# Altium footprint library WR-TBL_Pluggable Connector_3.50mm.PcbLib: 175 footprints (part 10 of 11)
Each footprint in its own frame and in the unit in brackets; x right, y up, seen from the top. Pads: shape width x height; smd on the part's side, far side on the other; paste and mask are expansions set on the pad; w line width, h text height; cw(c..) or ccw(c..) is an arc to the next point about the centre after c.
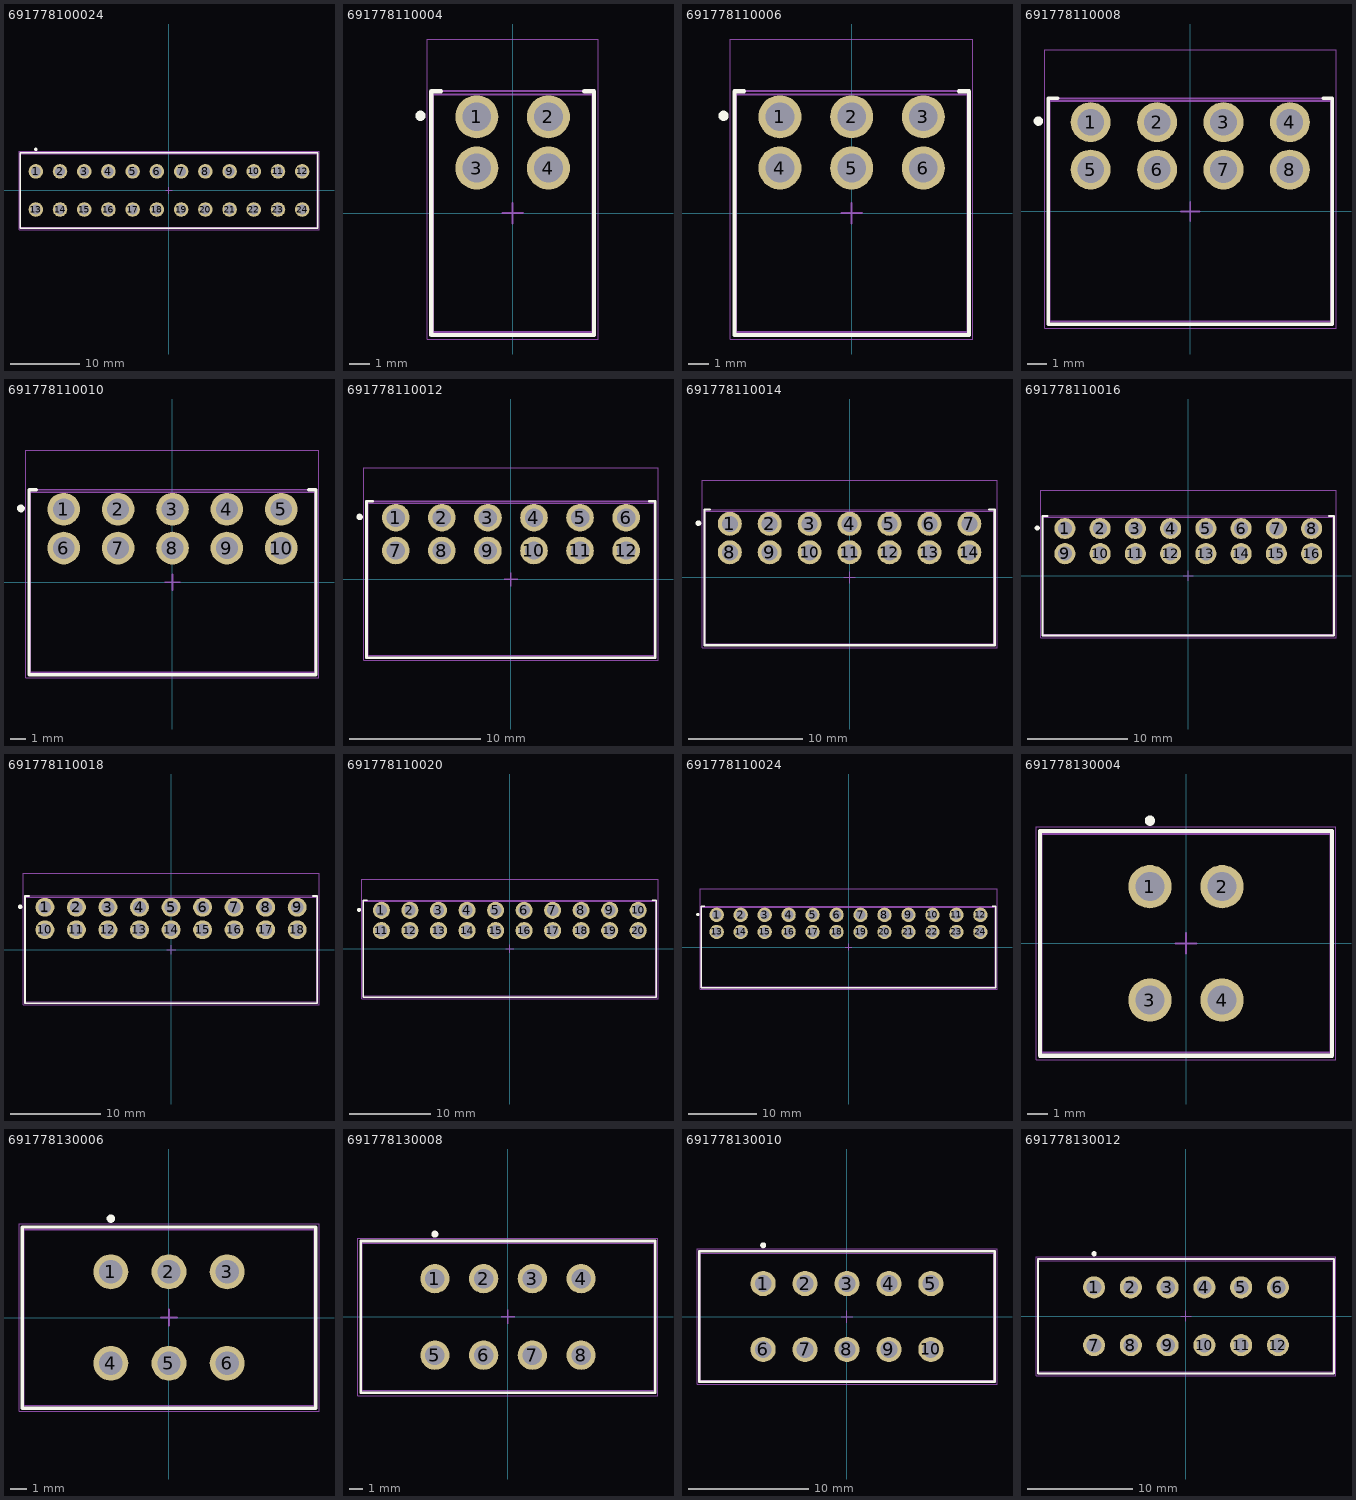
[diagram p9: the footprints below, top view; thin cyan lines are the x and y axes]

## 691778100024 [mm] "PCB Header, pitch 3.5mm, 24p"
height 10
pads (24):
  round 2.1 hole 1.4: 1(-19.25,2.75) 2(-15.75,2.75) 3(-12.25,2.75) 4(-8.75,2.75) 5(-5.25,2.75) 6(-1.75,2.75) 7(1.75,2.75) 8(5.25,2.75) 9(8.75,2.75) 10(12.25,2.75) 11(15.75,2.75) 12(19.25,2.75) 13(-19.25,-2.75) 14(-15.75,-2.75) 15(-12.25,-2.75) 16(-8.75,-2.75) 17(-5.25,-2.75) 18(-1.75,-2.75) 19(1.75,-2.75) 20(5.25,-2.75) 21(8.75,-2.75) 22(12.25,-2.75) 23(15.75,-2.75) 24(19.25,-2.75)
Top Overlay:
  circle w0.25: c-19.25,5.95 r0.125
  lines w0.2: -21.475,-5.45 21.475,-5.45 21.475,5.45 -21.475,5.45 -21.475,-5.45
Top Paste:
  region: 17.75,-0.45 20.75,-0.45 20.75,-5.05 17.75,-5.05
  region: 14.25,-0.45 17.25,-0.45 17.25,-5.05 14.25,-5.05
  region: 10.75,-0.45 13.75,-0.45 13.75,-5.05 10.75,-5.05
  region: 7.25,-0.45 10.25,-0.45 10.25,-5.05 7.25,-5.05
  region: 17.75,5.05 20.75,5.05 20.75,0.45 17.75,0.45
  region: 14.25,5.05 17.25,5.05 17.25,0.45 14.25,0.45
  region: 10.75,5.05 13.75,5.05 13.75,0.45 10.75,0.45
  region: 7.25,5.05 10.25,5.05 10.25,0.45 7.25,0.45
  region: -10.25,5.05 -7.25,5.05 -7.25,0.45 -10.25,0.45
  region: -13.75,5.05 -10.75,5.05 -10.75,0.45 -13.75,0.45
  region: -17.25,5.05 -14.25,5.05 -14.25,0.45 -17.25,0.45
  region: -20.75,5.05 -17.75,5.05 -17.75,0.45 -20.75,0.45
  region: -6.75,5.05 -3.75,5.05 -3.75,0.45 -6.75,0.45
  region: -3.25,5.05 -0.25,5.05 -0.25,0.45 -3.25,0.45
  region: 0.25,5.05 3.25,5.05 3.25,0.45 0.25,0.45
  region: 3.75,5.05 6.75,5.05 6.75,0.45 3.75,0.45
  region: -20.75,-0.45 -17.75,-0.45 -17.75,-5.05 -20.75,-5.05
  region: -17.25,-0.45 -14.25,-0.45 -14.25,-5.05 -17.25,-5.05
  region: -13.75,-0.45 -10.75,-0.45 -10.75,-5.05 -13.75,-5.05
  region: -10.25,-0.45 -7.25,-0.45 -7.25,-5.05 -10.25,-5.05
  region: -6.75,-0.45 -3.75,-0.45 -3.75,-5.05 -6.75,-5.05
  region: -3.25,-0.45 -0.25,-0.45 -0.25,-5.05 -3.25,-5.05
  region: 0.25,-0.45 3.25,-0.45 3.25,-5.05 0.25,-5.05
  region: 3.75,-0.45 6.75,-0.45 6.75,-5.05 3.75,-5.05
Top Assembly:
  lines w0.1: -21.475,-5.45 21.475,-5.45 21.475,5.45 -21.475,5.45 -21.475,-5.45
Top Designator:
  text ".Designator" at -3.647,-0.357 h1
Top 3D Body:
  lines w0.1: -21.4,-5.3 -21.4,5.3 21.4,5.3 21.4,-5.3 -21.4,-5.3
Top Courtyard:
  lines w0.05: -21.675,-5.65 -21.675,5.65 21.675,5.65 21.675,-5.65 -21.675,-5.65
Top Component Center:
  lines w0.1: -0.5,0 0.5,0 ; 0,-0.5 0,0.5
3D body "691778100024.stp": height 10.02, standoff -2.73, extent -21.4,-5.3 21.4,5.3

## 691778110004 [mm] "PCB Header, pitch 3.5mm, 04p"
height 10.8
pads (4):
  round 2.1 hole 1.4: 1(-1.75,4.7) 2(1.75,4.7) 3(-1.75,2.2) 4(1.75,2.2)
Top Overlay:
  circle w0.25: c-4.5,4.75 r0.125
  lines w0.2: -3.5,5.95 -3.975,5.95 -3.975,-5.95 3.975,-5.95 3.975,5.95 3.5,5.95
Top Paste:
  region: 0.25,-1.4 3.25,-1.4 3.25,3.25 0.25,3.25
  region: -3.25,-1.4 -0.25,-1.4 -0.25,3.25 -3.25,3.25
  region: 0.25,8.3 3.25,8.3 3.25,3.65 0.25,3.65
  region: -3.25,8.3 -0.25,8.3 -0.25,3.65 -3.25,3.65
Assembly Notes:
  text "Stencil Thickness: 120um" at -5.048,-6.87 h1
Top Assembly:
  lines w0.1: -3.975,-5.95 -3.975,5.95 3.975,5.95 3.975,-5.95 -3.975,-5.95
Top Designator:
  text ".Designator" at -3.647,-0.357 h1
Top 3D Body:
  lines w0.1: -3.9,-5.8 -3.9,5.8 3.9,5.8 3.9,-5.8 -3.9,-5.8
Top Courtyard:
  lines w0.05: -4.175,-6.15 -4.175,8.5 4.175,8.5 4.175,-6.15 -4.175,-6.15
Top Component Center:
  lines w0.1: -0.5,0 0.5,0 ; 0,-0.5 0,0.5
3D body "691778110004.stp": height 10.85, standoff -1.95, extent -3.9,-5.8 3.9,5.8

## 691778110006 [mm] "PCB Header, pitch 3.5mm, 06p"
height 10.8
pads (6):
  round 2.1 hole 1.4: 1(-3.5,4.7) 2(0,4.7) 3(3.5,4.7) 4(-3.5,2.2) 5(0,2.2) 6(3.5,2.2)
Top Overlay:
  circle w0.25: c-6.25,4.75 r0.125
  lines w0.2: -5.25,5.95 -5.725,5.95 -5.725,-5.95 5.725,-5.95 5.725,5.95 5.25,5.95
Top Paste:
  region: -5,8.3 -2,8.3 -2,3.65 -5,3.65
  region: -1.5,8.3 1.5,8.3 1.5,3.65 -1.5,3.65
  region: -5,-1.4 -2,-1.4 -2,3.25 -5,3.25
  region: -1.5,-1.4 1.5,-1.4 1.5,3.25 -1.5,3.25
  region: 2,8.3 5,8.3 5,3.65 2,3.65
  region: 2,-1.4 5,-1.4 5,3.25 2,3.25
Assembly Notes:
  text "Stencil Thickness: 120um" at -5.048,-6.87 h1
Top Assembly:
  lines w0.1: -5.725,-5.95 5.725,-5.95 5.725,5.95 -5.725,5.95 -5.725,-5.95
Top Designator:
  text ".Designator" at -3.647,-0.357 h1
Top 3D Body:
  lines w0.1: -5.65,-5.8 5.65,-5.8 5.65,5.8 -5.65,5.8 -5.65,-5.8
Top Courtyard:
  lines w0.05: -5.925,-6.15 5.925,-6.15 5.925,8.5 -5.925,8.5 -5.925,-6.15
Top Component Center:
  lines w0.1: -0.5,0 0.5,0 ; 0,-0.5 0,0.5
3D body "691778110006.stp": height 10.85, standoff -1.95, extent -5.65,-5.8 5.65,5.8

## 691778110008 [mm] "PCB Header, pitch 3.5mm, 08p"
height 10.8
pads (8):
  round 2.1 hole 1.4: 1(-5.25,4.7) 2(-1.75,4.7) 3(1.75,4.7) 4(5.25,4.7) 5(-5.25,2.2) 6(-1.75,2.2) 7(1.75,2.2) 8(5.25,2.2)
Top Overlay:
  circle w0.25: c-8,4.75 r0.125
  lines w0.2: -7,5.95 -7.475,5.95 -7.475,-5.95 7.475,-5.95 7.475,5.95 7,5.95
Top Paste:
  region: 0.25,-1.4 3.25,-1.4 3.25,3.25 0.25,3.25
  region: 0.25,8.3 3.25,8.3 3.25,3.65 0.25,3.65
  region: -3.25,-1.4 -0.25,-1.4 -0.25,3.25 -3.25,3.25
  region: -6.75,-1.4 -3.75,-1.4 -3.75,3.25 -6.75,3.25
  region: -3.25,8.3 -0.25,8.3 -0.25,3.65 -3.25,3.65
  region: -6.75,8.3 -3.75,8.3 -3.75,3.65 -6.75,3.65
  region: 3.75,8.3 6.75,8.3 6.75,3.65 3.75,3.65
  region: 3.75,-1.4 6.75,-1.4 6.75,3.25 3.75,3.25
Assembly Notes:
  text "Stencil Thickness: 120um" at -5.048,-6.87 h1
Top Assembly:
  lines w0.1: -7.475,-5.95 -7.475,5.95 7.475,5.95 7.475,-5.95 -7.475,-5.95
Top Designator:
  text ".Designator" at -3.647,-0.357 h1
Top 3D Body:
  lines w0.1: -7.4,-5.8 -7.4,5.8 7.4,5.8 7.4,-5.8 -7.4,-5.8
Top Courtyard:
  lines w0.05: -7.675,-6.15 -7.675,8.5 7.675,8.5 7.675,-6.15 -7.675,-6.15
Top Component Center:
  lines w0.1: -0.5,0 0.5,0 ; 0,-0.5 0,0.5
3D body "691778110008.stp": height 10.85, standoff -1.95, extent -7.4,-5.8 7.4,5.8

## 691778110010 [mm] "PCB Header, pitch 3.5mm, 10p"
height 10.8
pads (10):
  round 2.1 hole 1.4: 1(-7,4.7) 2(-3.5,4.7) 3(0,4.7) 4(3.5,4.7) 5(7,4.7) 6(-7,2.2) 7(-3.5,2.2) 8(0,2.2) 9(3.5,2.2) 10(7,2.2)
Top Overlay:
  circle w0.25: c-9.75,4.75 r0.125
  lines w0.2: -8.75,5.95 -9.225,5.95 -9.225,-5.95 9.225,-5.95 9.225,5.95 8.75,5.95
Top Paste:
  region: -1.5,-1.4 1.5,-1.4 1.5,3.25 -1.5,3.25
  region: -1.5,8.3 1.5,8.3 1.5,3.65 -1.5,3.65
  region: -5,-1.4 -2,-1.4 -2,3.25 -5,3.25
  region: -8.5,-1.4 -5.5,-1.4 -5.5,3.25 -8.5,3.25
  region: -5,8.3 -2,8.3 -2,3.65 -5,3.65
  region: -8.5,8.3 -5.5,8.3 -5.5,3.65 -8.5,3.65
  region: 2,8.3 5,8.3 5,3.65 2,3.65
  region: 2,-1.4 5,-1.4 5,3.25 2,3.25
  region: 5.5,8.3 8.5,8.3 8.5,3.65 5.5,3.65
  region: 5.5,-1.4 8.5,-1.4 8.5,3.25 5.5,3.25
Assembly Notes:
  text "Stencil Thickness: 120um" at -5.048,-6.87 h1
Top Assembly:
  lines w0.1: -9.225,-5.95 -9.225,5.95 9.225,5.95 9.225,-5.95 -9.225,-5.95
Top Designator:
  text ".Designator" at -3.647,-0.357 h1
Top 3D Body:
  lines w0.1: -9.15,-5.8 -9.15,5.8 9.15,5.8 9.15,-5.8 -9.15,-5.8
Top Courtyard:
  lines w0.05: -9.425,-6.15 -9.425,8.5 9.425,8.5 9.425,-6.15 -9.425,-6.15
Top Component Center:
  lines w0.1: -0.5,0 0.5,0 ; 0,-0.5 0,0.5
3D body "691778110010.stp": height 10.85, standoff -1.95, extent -9.15,-5.8 9.15,5.8

## 691778110012 [mm] "PCB Header, pitch 3.5mm, 12p"
height 10.8
pads (12):
  round 2.1 hole 1.4: 1(-8.75,4.7) 2(-5.25,4.7) 3(-1.75,4.7) 4(1.75,4.7) 5(5.25,4.7) 6(8.75,4.7) 7(-8.75,2.2) 8(-5.25,2.2) 9(-1.75,2.2) 10(1.75,2.2) 11(5.25,2.2) 12(8.75,2.2)
Top Overlay:
  circle w0.25: c-11.5,4.75 r0.125
  lines w0.2: -10.5,5.95 -10.975,5.95 -10.975,-5.95 10.975,-5.95 10.975,5.95 10.5,5.95
Top Paste:
  region: 7.25,-1.4 10.25,-1.4 10.25,3.25 7.25,3.25
  region: 7.25,8.3 10.25,8.3 10.25,3.65 7.25,3.65
  region: 3.75,-1.4 6.75,-1.4 6.75,3.25 3.75,3.25
  region: 3.75,8.3 6.75,8.3 6.75,3.65 3.75,3.65
  region: 0.25,-1.4 3.25,-1.4 3.25,3.25 0.25,3.25
  region: 0.25,8.3 3.25,8.3 3.25,3.65 0.25,3.65
  region: -10.25,8.3 -7.25,8.3 -7.25,3.65 -10.25,3.65
  region: -6.75,8.3 -3.75,8.3 -3.75,3.65 -6.75,3.65
  region: -10.25,-1.4 -7.25,-1.4 -7.25,3.25 -10.25,3.25
  region: -6.75,-1.4 -3.75,-1.4 -3.75,3.25 -6.75,3.25
  region: -3.25,8.3 -0.25,8.3 -0.25,3.65 -3.25,3.65
  region: -3.25,-1.4 -0.25,-1.4 -0.25,3.25 -3.25,3.25
Assembly Notes:
  text "Stencil Thickness: 120um" at -5.048,-6.87 h1
Top Assembly:
  lines w0.1: -10.975,-5.95 10.975,-5.95 10.975,5.95 -10.975,5.95 -10.975,-5.95
Top Designator:
  text ".Designator" at -3.647,-0.357 h1
Top 3D Body:
  lines w0.1: -10.9,-5.8 10.9,-5.8 10.9,5.8 -10.9,5.8 -10.9,-5.8
Top Courtyard:
  lines w0.05: -11.175,-6.15 11.175,-6.15 11.175,8.5 -11.175,8.5 -11.175,-6.15
Top Component Center:
  lines w0.1: -0.5,0 0.5,0 ; 0,-0.5 0,0.5
3D body "691778110012.stp": height 10.85, standoff -1.95, extent -10.9,-5.8 10.9,5.8

## 691778110014 [mm] "PCB Header, pitch 3.5mm, 14p"
height 10.8
pads (14):
  round 2.1 hole 1.4: 1(-10.5,4.7) 2(-7,4.7) 3(-3.5,4.7) 4(0,4.7) 5(3.5,4.7) 6(7,4.7) 7(10.5,4.7) 8(-10.5,2.2) 9(-7,2.2) 10(-3.5,2.2) 11(0,2.2) 12(3.5,2.2) 13(7,2.2) 14(10.5,2.2)
Top Overlay:
  circle w0.25: c-13.25,4.75 r0.125
  lines w0.2: -12.25,5.95 -12.725,5.95 -12.725,-5.95 12.725,-5.95 12.725,5.95 12.25,5.95
Top Paste:
  region: -5,-1.4 -2,-1.4 -2,3.25 -5,3.25
  region: -5,8.3 -2,8.3 -2,3.65 -5,3.65
  region: -8.5,-1.4 -5.5,-1.4 -5.5,3.25 -8.5,3.25
  region: -12,-1.4 -9,-1.4 -9,3.25 -12,3.25
  region: -8.5,8.3 -5.5,8.3 -5.5,3.65 -8.5,3.65
  region: -12,8.3 -9,8.3 -9,3.65 -12,3.65
  region: -1.5,8.3 1.5,8.3 1.5,3.65 -1.5,3.65
  region: -1.5,-1.4 1.5,-1.4 1.5,3.25 -1.5,3.25
  region: 2,8.3 5,8.3 5,3.65 2,3.65
  region: 2,-1.4 5,-1.4 5,3.25 2,3.25
  region: 5.5,8.3 8.5,8.3 8.5,3.65 5.5,3.65
  region: 5.5,-1.4 8.5,-1.4 8.5,3.25 5.5,3.25
  region: 9,8.3 12,8.3 12,3.65 9,3.65
  region: 9,-1.4 12,-1.4 12,3.25 9,3.25
Assembly Notes:
  text "Stencil Thickness: 120um" at -5.048,-6.87 h1
Top Assembly:
  lines w0.1: -12.725,-5.95 -12.725,5.95 12.725,5.95 12.725,-5.95 -12.725,-5.95
Top Designator:
  text ".Designator" at -3.647,-0.357 h1
Top 3D Body:
  lines w0.1: -12.65,-5.8 -12.65,5.8 12.65,5.8 12.65,-5.8 -12.65,-5.8
Top Courtyard:
  lines w0.05: -12.925,-6.15 -12.925,8.5 12.925,8.5 12.925,-6.15 -12.925,-6.15
Top Component Center:
  lines w0.1: -0.5,0 0.5,0 ; 0,-0.5 0,0.5
3D body "691778110014.stp": height 10.85, standoff -1.95, extent -12.65,-5.8 12.65,5.8

## 691778110016 [mm] "PCB Header, pitch 3.5mm, 16p"
height 10.8
pads (16):
  round 2.1 hole 1.4: 1(-12.25,4.7) 2(-8.75,4.7) 3(-5.25,4.7) 4(-1.75,4.7) 5(1.75,4.7) 6(5.25,4.7) 7(8.75,4.7) 8(12.25,4.7) 9(-12.25,2.2) 10(-8.75,2.2) 11(-5.25,2.2) 12(-1.75,2.2) 13(1.75,2.2) 14(5.25,2.2) 15(8.75,2.2) 16(12.25,2.2)
Top Overlay:
  circle w0.25: c-15,4.75 r0.125
  lines w0.2: -14,5.95 -14.475,5.95 -14.475,-5.95 14.475,-5.95 14.475,5.95 14,5.95
Top Paste:
  region: 10.75,-1.4 13.75,-1.4 13.75,3.25 10.75,3.25
  region: 10.75,8.3 13.75,8.3 13.75,3.65 10.75,3.65
  region: 7.25,-1.4 10.25,-1.4 10.25,3.25 7.25,3.25
  region: 7.25,8.3 10.25,8.3 10.25,3.65 7.25,3.65
  region: 3.75,-1.4 6.75,-1.4 6.75,3.25 3.75,3.25
  region: 3.75,8.3 6.75,8.3 6.75,3.65 3.75,3.65
  region: 0.25,-1.4 3.25,-1.4 3.25,3.25 0.25,3.25
  region: 0.25,8.3 3.25,8.3 3.25,3.65 0.25,3.65
  region: -3.25,-1.4 -0.25,-1.4 -0.25,3.25 -3.25,3.25
  region: -3.25,8.3 -0.25,8.3 -0.25,3.65 -3.25,3.65
  region: -13.75,8.3 -10.75,8.3 -10.75,3.65 -13.75,3.65
  region: -10.25,8.3 -7.25,8.3 -7.25,3.65 -10.25,3.65
  region: -13.75,-1.4 -10.75,-1.4 -10.75,3.25 -13.75,3.25
  region: -10.25,-1.4 -7.25,-1.4 -7.25,3.25 -10.25,3.25
  region: -6.75,8.3 -3.75,8.3 -3.75,3.65 -6.75,3.65
  region: -6.75,-1.4 -3.75,-1.4 -3.75,3.25 -6.75,3.25
Assembly Notes:
  text "Stencil Thickness: 120um" at -5.048,-6.87 h1
Top Assembly:
  lines w0.1: -14.475,-5.95 14.475,-5.95 14.475,5.95 -14.475,5.95 -14.475,-5.95
Top Designator:
  text ".Designator" at -3.647,-0.357 h1
Top 3D Body:
  lines w0.1: -14.4,-5.8 14.4,-5.8 14.4,5.8 -14.4,5.8 -14.4,-5.8
Top Courtyard:
  lines w0.05: -14.675,-6.15 14.675,-6.15 14.675,8.5 -14.675,8.5 -14.675,-6.15
Top Component Center:
  lines w0.1: -0.5,0 0.5,0 ; 0,-0.5 0,0.5
3D body "691778110016.stp": height 10.85, standoff -1.95, extent -14.4,-5.8 14.4,5.8

## 691778110018 [mm] "PCB Header, pitch 3.5mm, 18p"
height 10.8
pads (18):
  round 2.1 hole 1.4: 1(-14,4.7) 2(-10.5,4.7) 3(-7,4.7) 4(-3.5,4.7) 5(0,4.7) 6(3.5,4.7) 7(7,4.7) 8(10.5,4.7) 9(14,4.7) 10(-14,2.2) 11(-10.5,2.2) 12(-7,2.2) 13(-3.5,2.2) 14(0,2.2) 15(3.5,2.2) 16(7,2.2) 17(10.5,2.2) 18(14,2.2)
Top Overlay:
  circle w0.25: c-16.75,4.75 r0.125
  lines w0.2: -15.75,5.95 -16.225,5.95 -16.225,-5.95 16.225,-5.95 16.225,5.95 15.75,5.95
Top Paste:
  region: -8.5,-1.4 -5.5,-1.4 -5.5,3.25 -8.5,3.25
  region: -8.5,8.3 -5.5,8.3 -5.5,3.65 -8.5,3.65
  region: -12,-1.4 -9,-1.4 -9,3.25 -12,3.25
  region: -15.5,-1.4 -12.5,-1.4 -12.5,3.25 -15.5,3.25
  region: -12,8.3 -9,8.3 -9,3.65 -12,3.65
  region: -15.5,8.3 -12.5,8.3 -12.5,3.65 -15.5,3.65
  region: -5,8.3 -2,8.3 -2,3.65 -5,3.65
  region: -5,-1.4 -2,-1.4 -2,3.25 -5,3.25
  region: -1.5,8.3 1.5,8.3 1.5,3.65 -1.5,3.65
  region: -1.5,-1.4 1.5,-1.4 1.5,3.25 -1.5,3.25
  region: 2,8.3 5,8.3 5,3.65 2,3.65
  region: 2,-1.4 5,-1.4 5,3.25 2,3.25
  region: 5.5,8.3 8.5,8.3 8.5,3.65 5.5,3.65
  region: 5.5,-1.4 8.5,-1.4 8.5,3.25 5.5,3.25
  region: 9,8.3 12,8.3 12,3.65 9,3.65
  region: 9,-1.4 12,-1.4 12,3.25 9,3.25
  region: 12.5,8.3 15.5,8.3 15.5,3.65 12.5,3.65
  region: 12.5,-1.4 15.5,-1.4 15.5,3.25 12.5,3.25
Assembly Notes:
  text "Stencil Thickness: 120um" at -5.048,-6.87 h1
Top Assembly:
  lines w0.1: -16.225,-5.95 -16.225,5.95 16.225,5.95 16.225,-5.95 -16.225,-5.95
Top Designator:
  text ".Designator" at -3.647,-0.357 h1
Top 3D Body:
  lines w0.1: -16.15,-5.8 -16.15,5.8 16.15,5.8 16.15,-5.8 -16.15,-5.8
Top Courtyard:
  lines w0.05: -16.425,-6.15 -16.425,8.5 16.425,8.5 16.425,-6.15 -16.425,-6.15
Top Component Center:
  lines w0.1: -0.5,0 0.5,0 ; 0,-0.5 0,0.5
3D body "691778110018.stp": height 10.85, standoff -1.95, extent -16.15,-5.8 16.15,5.8

## 691778110020 [mm] "PCB Header, pitch 3.5mm, 20p"
height 10.8
pads (20):
  round 2.1 hole 1.4: 1(-15.75,4.7) 2(-12.25,4.7) 3(-8.75,4.7) 4(-5.25,4.7) 5(-1.75,4.7) 6(1.75,4.7) 7(5.25,4.7) 8(8.75,4.7) 9(12.25,4.7) 10(15.75,4.7) 11(-15.75,2.2) 12(-12.25,2.2) 13(-8.75,2.2) 14(-5.25,2.2) 15(-1.75,2.2) 16(1.75,2.2) 17(5.25,2.2) 18(8.75,2.2) 19(12.25,2.2) 20(15.75,2.2)
Top Overlay:
  circle w0.25: c-18.5,4.75 r0.125
  lines w0.2: -17.5,5.95 -17.975,5.95 -17.975,-5.95 17.975,-5.95 17.975,5.95 17.5,5.95
Top Paste:
  region: -10.25,-1.4 -7.25,-1.4 -7.25,3.25 -10.25,3.25
  region: -10.25,8.3 -7.25,8.3 -7.25,3.65 -10.25,3.65
  region: -13.75,-1.4 -10.75,-1.4 -10.75,3.25 -13.75,3.25
  region: -17.25,-1.4 -14.25,-1.4 -14.25,3.25 -17.25,3.25
  region: -13.75,8.3 -10.75,8.3 -10.75,3.65 -13.75,3.65
  region: -17.25,8.3 -14.25,8.3 -14.25,3.65 -17.25,3.65
  region: -6.75,8.3 -3.75,8.3 -3.75,3.65 -6.75,3.65
  region: -6.75,-1.4 -3.75,-1.4 -3.75,3.25 -6.75,3.25
  region: -3.25,8.3 -0.25,8.3 -0.25,3.65 -3.25,3.65
  region: -3.25,-1.4 -0.25,-1.4 -0.25,3.25 -3.25,3.25
  region: 0.25,8.3 3.25,8.3 3.25,3.65 0.25,3.65
  region: 0.25,-1.4 3.25,-1.4 3.25,3.25 0.25,3.25
  region: 3.75,8.3 6.75,8.3 6.75,3.65 3.75,3.65
  region: 3.75,-1.4 6.75,-1.4 6.75,3.25 3.75,3.25
  region: 7.25,8.3 10.25,8.3 10.25,3.65 7.25,3.65
  region: 7.25,-1.4 10.25,-1.4 10.25,3.25 7.25,3.25
  region: 10.75,8.3 13.75,8.3 13.75,3.65 10.75,3.65
  region: 10.75,-1.4 13.75,-1.4 13.75,3.25 10.75,3.25
  region: 14.25,8.3 17.25,8.3 17.25,3.65 14.25,3.65
  region: 14.25,-1.4 17.25,-1.4 17.25,3.25 14.25,3.25
Assembly Notes:
  text "Stencil Thickness: 120um" at -5.048,-6.87 h1
Top Assembly:
  lines w0.1: -17.975,-5.95 -17.975,5.95 17.975,5.95 17.975,-5.95 -17.975,-5.95
Top Designator:
  text ".Designator" at -3.647,-0.357 h1
Top 3D Body:
  lines w0.1: -17.9,-5.8 -17.9,5.8 17.9,5.8 17.9,-5.8 -17.9,-5.8
Top Courtyard:
  lines w0.05: -18.175,-6.15 -18.175,8.5 18.175,8.5 18.175,-6.15 -18.175,-6.15
Top Component Center:
  lines w0.1: -0.5,0 0.5,0 ; 0,-0.5 0,0.5
3D body "691778110020.stp": height 10.85, standoff -1.95, extent -17.9,-5.8 17.9,5.8

## 691778110024 [mm] "PCB Header, pitch 3.5mm, 24p"
height 10.8
pads (24):
  round 2.1 hole 1.4: 1(-19.25,4.7) 2(-15.75,4.7) 3(-12.25,4.7) 4(-8.75,4.7) 5(-5.25,4.7) 6(-1.75,4.7) 7(1.75,4.7) 8(5.25,4.7) 9(8.75,4.7) 10(12.25,4.7) 11(15.75,4.7) 12(19.25,4.7) 13(-19.25,2.2) 14(-15.75,2.2) 15(-12.25,2.2) 16(-8.75,2.2) 17(-5.25,2.2) 18(-1.75,2.2) 19(1.75,2.2) 20(5.25,2.2) 21(8.75,2.2) 22(12.25,2.2) 23(15.75,2.2) 24(19.25,2.2)
Top Overlay:
  circle w0.25: c-22,4.75 r0.125
  lines w0.2: -21,5.95 -21.475,5.95 -21.475,-5.95 21.475,-5.95 21.475,5.95 21,5.95
Top Paste:
  region: 17.75,-1.4 20.75,-1.4 20.75,3.25 17.75,3.25
  region: 17.75,8.3 20.75,8.3 20.75,3.65 17.75,3.65
  region: 14.25,-1.4 17.25,-1.4 17.25,3.25 14.25,3.25
  region: 14.25,8.3 17.25,8.3 17.25,3.65 14.25,3.65
  region: 10.75,-1.4 13.75,-1.4 13.75,3.25 10.75,3.25
  region: 10.75,8.3 13.75,8.3 13.75,3.65 10.75,3.65
  region: 7.25,-1.4 10.25,-1.4 10.25,3.25 7.25,3.25
  region: 7.25,8.3 10.25,8.3 10.25,3.65 7.25,3.65
  region: 3.75,-1.4 6.75,-1.4 6.75,3.25 3.75,3.25
  region: 3.75,8.3 6.75,8.3 6.75,3.65 3.75,3.65
  region: 0.25,-1.4 3.25,-1.4 3.25,3.25 0.25,3.25
  region: 0.25,8.3 3.25,8.3 3.25,3.65 0.25,3.65
  region: -3.25,-1.4 -0.25,-1.4 -0.25,3.25 -3.25,3.25
  region: -3.25,8.3 -0.25,8.3 -0.25,3.65 -3.25,3.65
  region: -6.75,-1.4 -3.75,-1.4 -3.75,3.25 -6.75,3.25
  region: -6.75,8.3 -3.75,8.3 -3.75,3.65 -6.75,3.65
  region: -10.25,-1.4 -7.25,-1.4 -7.25,3.25 -10.25,3.25
  region: -10.25,8.3 -7.25,8.3 -7.25,3.65 -10.25,3.65
  region: -20.75,8.3 -17.75,8.3 -17.75,3.65 -20.75,3.65
  region: -17.25,8.3 -14.25,8.3 -14.25,3.65 -17.25,3.65
  region: -20.75,-1.4 -17.75,-1.4 -17.75,3.25 -20.75,3.25
  region: -17.25,-1.4 -14.25,-1.4 -14.25,3.25 -17.25,3.25
  region: -13.75,8.3 -10.75,8.3 -10.75,3.65 -13.75,3.65
  region: -13.75,-1.4 -10.75,-1.4 -10.75,3.25 -13.75,3.25
Assembly Notes:
  text "Stencil Thickness: 120um" at -5.048,-6.87 h1
Top Assembly:
  lines w0.1: -21.475,-5.95 21.475,-5.95 21.475,5.95 -21.475,5.95 -21.475,-5.95
Top Designator:
  text ".Designator" at -3.647,-0.357 h1
Top 3D Body:
  lines w0.1: -21.4,-5.8 21.4,-5.8 21.4,5.8 -21.4,5.8 -21.4,-5.8
Top Courtyard:
  lines w0.05: -21.675,-6.15 21.675,-6.15 21.675,8.5 -21.675,8.5 -21.675,-6.15
Top Component Center:
  lines w0.1: -0.5,0 0.5,0 ; 0,-0.5 0,0.5
3D body "691778110024.stp": height 10.85, standoff -1.95, extent -21.4,-5.8 21.4,5.8

## 691778130004 [mm] "PCB Header, pitch 3.5mm, 04p"
height 10
pads (4):
  round 2.1 hole 1.4: 1(-1.75,2.75) 2(1.75,2.75) 3(-1.75,-2.75) 4(1.75,-2.75)
Top Overlay:
  circle w0.25: c-1.75,5.95 r0.125
  lines w0.2: -7.075,-5.45 -7.075,5.45 7.075,5.45 7.075,-5.45 -7.075,-5.45
Top Paste:
  region: -3.25,5.1 -0.25,5.1 -0.25,0.45 -3.25,0.45
  region: 0.25,5.1 3.25,5.1 3.25,0.45 0.25,0.45
  region: -3.25,-0.4 -0.25,-0.4 -0.25,-5.05 -3.25,-5.05
  region: 0.25,-0.4 3.25,-0.4 3.25,-5.05 0.25,-5.05
Assembly Notes:
  text "Stencil Thickness: 120um" at -5.048,-6.37 h1
Top Assembly:
  lines w0.1: -7.075,-5.45 -7.075,5.45 7.075,5.45 7.075,-5.45 -7.075,-5.45
Top Designator:
  text ".Designator" at -3.647,-0.357 h1
Top 3D Body:
  lines w0.1: -7,-5.3 -7,5.3 7,5.3 7,-5.3 -7,-5.3
Top Courtyard:
  lines w0.05: -7.275,-5.65 -7.275,5.65 7.275,5.65 7.275,-5.65 -7.275,-5.65
Top Component Center:
  lines w0.1: -0.5,0 0.5,0 ; 0,-0.5 0,0.5
3D body "691778130004.stp": height 10.05, standoff -1.95, extent -7,-5.3 7,5.3

## 691778130006 [mm] "PCB Header, pitch 3.5mm, 06p"
height 10
pads (6):
  round 2.1 hole 1.4: 1(-3.5,2.75) 2(0,2.75) 3(3.5,2.75) 4(-3.5,-2.75) 5(0,-2.75) 6(3.5,-2.75)
Top Overlay:
  circle w0.25: c-3.5,5.95 r0.125
  lines w0.2: -8.825,-5.45 8.825,-5.45 8.825,5.45 -8.825,5.45 -8.825,-5.45
Top Paste:
  region: -5,-0.4 -2,-0.4 -2,-5.05 -5,-5.05
  region: -1.5,5.1 1.5,5.1 1.5,0.45 -1.5,0.45
  region: -5,5.1 -2,5.1 -2,0.45 -5,0.45
  region: 2,5.1 5,5.1 5,0.45 2,0.45
  region: -1.5,-0.4 1.5,-0.4 1.5,-5.05 -1.5,-5.05
  region: 2,-0.4 5,-0.4 5,-5.05 2,-5.05
Assembly Notes:
  text "Stencil Thickness: 120um" at -5.048,-6.37 h1
Top Assembly:
  lines w0.1: -8.825,-5.45 8.825,-5.45 8.825,5.45 -8.825,5.45 -8.825,-5.45
Top Designator:
  text ".Designator" at -3.647,-0.357 h1
Top 3D Body:
  lines w0.1: -8.75,-5.3 8.75,-5.3 8.75,5.3 -8.75,5.3 -8.75,-5.3
Top Courtyard:
  lines w0.05: -9.025,-5.65 9.025,-5.65 9.025,5.65 -9.025,5.65 -9.025,-5.65
Top Component Center:
  lines w0.1: -0.5,0 0.5,0 ; 0,-0.5 0,0.5
3D body "691778130006.stp": height 10.05, standoff -1.95, extent -8.75,-5.3 8.75,5.3

## 691778130008 [mm] "PCB Header, pitch 3.5mm, 08p"
height 10
pads (8):
  round 2.1 hole 1.4: 1(-5.25,2.75) 2(-1.75,2.75) 3(1.75,2.75) 4(5.25,2.75) 5(-5.25,-2.75) 6(-1.75,-2.75) 7(1.75,-2.75) 8(5.25,-2.75)
Top Overlay:
  circle w0.25: c-5.25,5.95 r0.125
  lines w0.2: -10.575,-5.45 10.575,-5.45 10.575,5.45 -10.575,5.45 -10.575,-5.45
Top Paste:
  region: 3.75,5.1 6.75,5.1 6.75,0.45 3.75,0.45
  region: -3.25,5.1 -0.25,5.1 -0.25,0.45 -3.25,0.45
  region: -6.75,5.1 -3.75,5.1 -3.75,0.45 -6.75,0.45
  region: 0.25,5.1 3.25,5.1 3.25,0.45 0.25,0.45
  region: -6.75,-0.4 -3.75,-0.4 -3.75,-5.05 -6.75,-5.05
  region: -3.25,-0.4 -0.25,-0.4 -0.25,-5.05 -3.25,-5.05
  region: 0.25,-0.4 3.25,-0.4 3.25,-5.05 0.25,-5.05
  region: 3.75,-0.4 6.75,-0.4 6.75,-5.05 3.75,-5.05
Assembly Notes:
  text "Stencil Thickness: 120um" at -5.048,-6.37 h1
Top Assembly:
  lines w0.1: -10.575,-5.45 10.575,-5.45 10.575,5.45 -10.575,5.45 -10.575,-5.45
Top Designator:
  text ".Designator" at -3.647,-0.357 h1
Top 3D Body:
  lines w0.1: -10.5,-5.3 10.5,-5.3 10.5,5.3 -10.5,5.3 -10.5,-5.3
Top Courtyard:
  lines w0.05: -10.775,-5.65 10.775,-5.65 10.775,5.65 -10.775,5.65 -10.775,-5.65
Top Component Center:
  lines w0.1: -0.5,0 0.5,0 ; 0,-0.5 0,0.5
3D body "691778130008.stp": height 10.05, standoff -1.95, extent -10.5,-5.3 10.5,5.3

## 691778130010 [mm] "PCB Header, pitch 3.5mm, 10p"
height 10
pads (10):
  round 2.1 hole 1.4: 1(-7,2.75) 2(-3.5,2.75) 3(0,2.75) 4(3.5,2.75) 5(7,2.75) 6(-7,-2.75) 7(-3.5,-2.75) 8(0,-2.75) 9(3.5,-2.75) 10(7,-2.75)
Top Overlay:
  circle w0.25: c-7,5.95 r0.125
  lines w0.2: -12.325,-5.45 -12.325,5.45 12.325,5.45 12.325,-5.45 -12.325,-5.45
Top Paste:
  region: 5.5,-0.4 8.5,-0.4 8.5,-5.05 5.5,-5.05
  region: 2,-0.4 5,-0.4 5,-5.05 2,-5.05
  region: -1.5,-0.4 1.5,-0.4 1.5,-5.05 -1.5,-5.05
  region: -5,-0.4 -2,-0.4 -2,-5.05 -5,-5.05
  region: -8.5,-0.4 -5.5,-0.4 -5.5,-5.05 -8.5,-5.05
  region: 5.5,5.1 8.5,5.1 8.5,0.45 5.5,0.45
  region: -1.5,5.1 1.5,5.1 1.5,0.45 -1.5,0.45
  region: -8.5,5.1 -5.5,5.1 -5.5,0.45 -8.5,0.45
  region: -5,5.1 -2,5.1 -2,0.45 -5,0.45
  region: 2,5.1 5,5.1 5,0.45 2,0.45
Assembly Notes:
  text "Stencil Thickness: 120um" at -5.048,-6.37 h1
Top Assembly:
  lines w0.1: -12.325,-5.45 -12.325,5.45 12.325,5.45 12.325,-5.45 -12.325,-5.45
Top Designator:
  text ".Designator" at -3.647,-0.357 h1
Top 3D Body:
  lines w0.1: -12.25,-5.3 -12.25,5.3 12.25,5.3 12.25,-5.3 -12.25,-5.3
Top Courtyard:
  lines w0.05: -12.525,-5.65 -12.525,5.65 12.525,5.65 12.525,-5.65 -12.525,-5.65
Top Component Center:
  lines w0.1: -0.5,0 0.5,0 ; 0,-0.5 0,0.5
3D body "691778130010.stp": height 10.05, standoff -1.95, extent -12.25,-5.3 12.25,5.3

## 691778130012 [mm] "PCB Header, pitch 3.5mm, 12p"
height 10
pads (12):
  round 2.1 hole 1.4: 1(-8.75,2.75) 2(-5.25,2.75) 3(-1.75,2.75) 4(1.75,2.75) 5(5.25,2.75) 6(8.75,2.75) 7(-8.75,-2.75) 8(-5.25,-2.75) 9(-1.75,-2.75) 10(1.75,-2.75) 11(5.25,-2.75) 12(8.75,-2.75)
Top Overlay:
  circle w0.25: c-8.75,5.95 r0.125
  lines w0.2: -14.075,-5.45 14.075,-5.45 14.075,5.45 -14.075,5.45 -14.075,-5.45
Top Paste:
  region: 0.25,5.1 3.25,5.1 3.25,0.45 0.25,0.45
  region: -6.75,5.1 -3.75,5.1 -3.75,0.45 -6.75,0.45
  region: -10.25,5.1 -7.25,5.1 -7.25,0.45 -10.25,0.45
  region: -3.25,5.1 -0.25,5.1 -0.25,0.45 -3.25,0.45
  region: 3.75,5.1 6.75,5.1 6.75,0.45 3.75,0.45
  region: 7.25,5.1 10.25,5.1 10.25,0.45 7.25,0.45
  region: -10.25,-0.4 -7.25,-0.4 -7.25,-5.05 -10.25,-5.05
  region: -6.75,-0.4 -3.75,-0.4 -3.75,-5.05 -6.75,-5.05
  region: -3.25,-0.4 -0.25,-0.4 -0.25,-5.05 -3.25,-5.05
  region: 0.25,-0.4 3.25,-0.4 3.25,-5.05 0.25,-5.05
  region: 3.75,-0.4 6.75,-0.4 6.75,-5.05 3.75,-5.05
  region: 7.25,-0.4 10.25,-0.4 10.25,-5.05 7.25,-5.05
Assembly Notes:
  text "Stencil Thickness: 120um" at -5.048,-6.37 h1
Top Assembly:
  lines w0.1: -14.075,-5.45 14.075,-5.45 14.075,5.45 -14.075,5.45 -14.075,-5.45
Top Designator:
  text ".Designator" at -3.647,-0.357 h1
Top 3D Body:
  lines w0.1: -14,-5.3 14,-5.3 14,5.3 -14,5.3 -14,-5.3
Top Courtyard:
  lines w0.05: -14.275,-5.65 14.275,-5.65 14.275,5.65 -14.275,5.65 -14.275,-5.65
Top Component Center:
  lines w0.1: -0.5,0 0.5,0 ; 0,-0.5 0,0.5
3D body "691778130012.stp": height 10.05, standoff -1.95, extent -14,-5.3 14,5.3